# Altium schematic symbol library Schlib1.SchLib: 65 symbols
Pins are listed as number, name and electrical type; pins without a type are passive.

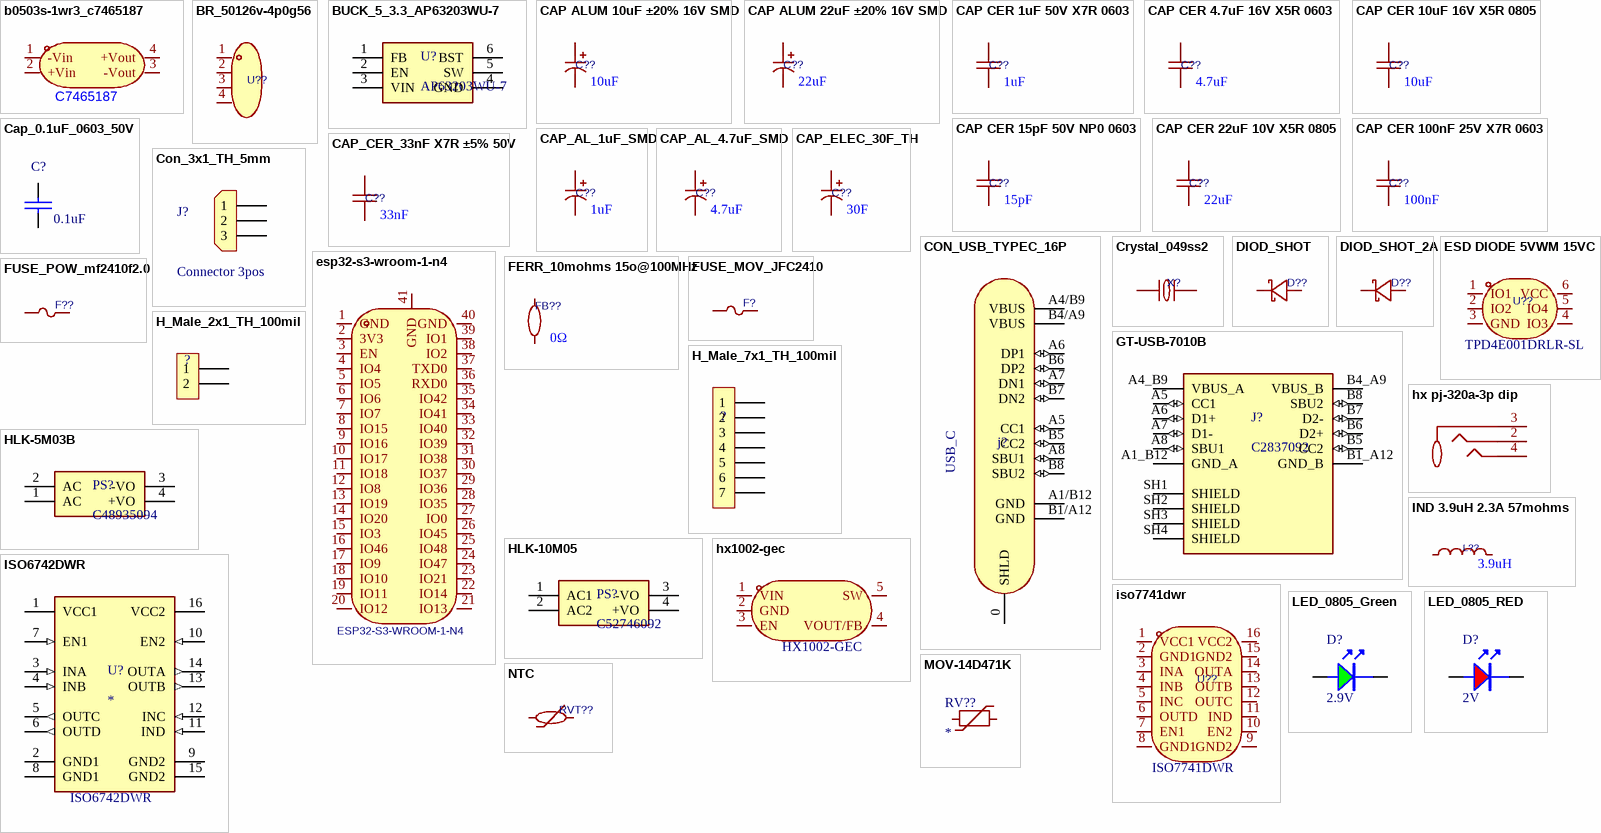
[diagram p0: symbols b0503s-1wr3_c7465187 to NTC]

## b0503s-1wr3_c7465187
designator U??  Supplier Part Number 1: C7465187  (hidden comment: b0503s-1wr3_c7465187)
Type:Plastic encapsulated type Number of Outputs:1 Output Power:1W Voltage - Supply:4.5V~5.5V Voltage - Supply:4.5V~5.5V Conversion Efficiency:74% Conversion Efficiency:74% Output Voltage:3.3V Output Voltage:3.3V Output Current(Max):303mA Output Current(M; Manufacturer 1: EVISUN(易成); Manufacturer Part Number 1: B0503S-1WR3; Supplier 1: LCSC; ComponentLink1Description: LCSC; ComponentLink1URL: https://www.lcsc.com/product-detail/C7465187.html?s_z=n_q_p_b0503s-1wr3_c7465187
footprint PWRM-TH_B0503S-1WR2
pins: 1 -Vin, 2 +Vin, 3 -Vout, 4 +Vout

## BR_50126v-4p0g56
designator U??, comment c50126v-4p0g56  (value not drawn)
Number of Positions or Pins:1x4P Pitch:5mm Color:Green Mounting Type:Through Hole Number of Pins:4P Number of Rows:1 Number of PINs Per Row:4 Current Rating:18A Voltage Rating (Max):250V Wire Gauge - AWG:14~26 Wire Gauge - mm2:0.5~2.5 Wire Gauge - mm2:0.5; Manufacturer 1: JXTCONN; Manufacturer Part Number 1: C50126V-4P0G56; Supplier 1: LCSC; Supplier Part Number 1: C49291885; ComponentLink1Description: LCSC; ComponentLink1URL: https://www.lcsc.com/es/product-detail/C49291885.html?spm=wm.fly.bg.2.xh&lcsc_vid=QARXAVUEQ1ELXl1fE1ZXXgVfFgdaUV1TRAUKVFNRFFAxVlNfRlVdU1NQQFdcUTtW; Color: Green
footprint CONN-TH_C50126V-4P0G56
pins: 1, 2, 3, 4

## BUCK_5_3.3_AP63203WU-7
designator U?, comment AP63203WU-7
Buck Switching Regulator IC Positive Fixed 3.3V 1 Output 2A SOT-23-6 Thin, TSOT-23-6; Manufacturer 1: DIODES; ComponentLink1Description: LCSC; ComponentLink1URL: https://www.lcsc.com/es/product-detail/C780769.html?s_z=n_q_AP63203WU-7&spm=wm.fly.bg.0.xh&lcsc_vid=FFRdVwAETgNbVwAHTlRdV1UFEwcIU1ZXQVZZAlYFQAcxVlNfRlJdU1dXT1JWUTsOAxUeFF5JWBYZEEoKFBINSQcJGk4LFEsWBQ4KEgcSWgULEwUPG04tU11VRVdYVF1IHxUDCw%3D%3D; Manufacturer Part Number 1: AP63203WU-7; Supplier 1: LCSC; Supplier Part Number 1: C780769
footprint SOIC_05WU-7_DIO-M
pins: 1 FB, 2 EN, 3 VIN, 4 GND, 5 SW, 6 BST

## CAP ALUM 10uF ±20% 16V SMD
designator C??, comment value 10uF  (hidden comment: ROQANG VT1C100M0405)
Capacitance:4.7uF Tolerance:±20% Tolerance:±20% Voltage Rating:25V Diameter:4mm Height - Seated (Max):5.4mm Operating Temperature:-40℃~+105℃ Operating Temperature:-40℃~+105℃; ComponentLink1Description: LCSC; ComponentLink1URL: https://www.lcsc.com/es/product-detail/C213487.html?s_z=n_q_t_capacitor&spm=wm.fly.bg.2.xh___wm.ssy.tc.4.tz&lcsc_vid=T1EMUlBeR1ALUlVSFANeUFcFR1BWV1EHFVFaA1dQElAxVlNfRlJaV1FUQldbXzsOAxUeFF5JWBYZEEoKFBINSQcJGk4NBhYS; Manufacturer 1: ROQANG; Manufacturer Part Number 1: VT1C100M0405; Supplier 1: LCSC; Supplier Part Number 1: C213487
footprint CAP-SMD_BD4.0-L4.3-W4.3-FD
pins: 1, 2

## CAP ALUM 22uF ±20% 16V SMD
designator C??, comment value 22uF  (hidden comment: ROQANG CK1C220M-CRC54)
Capacitance:22uF Tolerance:±20% Tolerance:±20% Voltage Rating:25V Diameter:4mm Height - Seated (Max):5.4mm Operating Temperature:-40℃~+105℃ Operating Temperature:-40℃~+105℃; ComponentLink1Description: LCSC; ComponentLink1URL: https://www.lcsc.com/es/product-detail/C3001225.html?s_z=n_q_t_capacitor&spm=wm.fly.bg.18.xh___wm.ssy.tc.4.tz&lcsc_vid=T1EMUlBeR1ALUlVSFANeUFcFR1BWV1EHFVFaA1dQElAxVlNfRlJaV1FUQldbXzsOAxUeFF5JWBYZEEoKFBINSQcJGk4NBhYS; Manufacturer 1: ROQANG; Manufacturer Part Number 1: CK1C220M-CRC54; Supplier 1: LCSC; Supplier Part Number 1: C3001225
footprint CAP-SMD_BD4.0-L4.3-W4.3-FD
pins: 1, 2

## CAP CER 1uF 50V X7R 0603
designator C??, comment value 1uF  (hidden comment: CL10B105KB8NQNC)
Capacitance:1uF Tolerance:±20% Tolerance:±20% Voltage Rating:50V Ripple Current:- Equivalent Series Resistance(ESR):- Diameter:4mm Height - Seated (Max):5.4mm Lifetime:1000hrs@105℃ Operating Temperature:-45℃~+105℃ Operating Temperature:-45℃~+105℃; Manufacturer 1: Samsung Electro-Mechanics; ComponentLink1Description: LCSC; ComponentLink1URL: https://www.lcsc.com/es/product-detail/C5199872.html?spm=wm.fly.bg.9.xh&lcsc_vid=ElBYBFACR1JaVQdSQ1NeBFwHFAdfUFIFEwUNXlwCEVQxVlNfRlVWUFNWT1hWUDtW; Manufacturer Part Number 1: CL10B105KB8NQNC; Supplier 1: LSCS; Supplier Part Number 1: C5199872
footprint 0603_cap
pins: 1, 2

## CAP CER 4.7uF 16V X5R 0603
designator C??, comment value 4.7uF  (hidden comment: Samsung Electro-Mechanics)
CAP CER 4.7uF 16V X5R 0603; Manufacturer Part Number 1: CL10A475KO8NNNC; ComponentLink1Description: New link; ComponentLink1URL: https://www.lcsc.com/es/product-detail/C19666.html?spm=wm.fly.bg.0.xh___wm.fly.tp.3.ml&lcsc_vid=T1JZUwUCEwNbBlAHEwBdAVwDRAQPAV1eEVFfVgECQlMxVlNfRFdeV1BRRFhaUzsOAxUeFF5JWBYZEEoKFBINSQcJGk4LFEsFFhULAAsUDk5dV0oOAwwC; Manufacturer 1: Samsung Electro-Mechanics; Supplier Part Number 1: C19666; Supplier 1: LCSC
footprint 0603_cap
pins: 1, 2

## CAP CER 10uF 16V X5R 0805
designator C??, comment value 10uF  (hidden comment: muRata GRM21BR61C106KE15L)
CAP CER 10uF 16V X5R 0805; ComponentLink1Description: New link; ComponentLink1URL: https://www.lcsc.com/es/product-detail/C77075.html?spm=wm.fly.bg.11.xh___wm.fly.dhl.mly.13-0-3&lcsc_vid=ElBYBFACR1JaVQdSQ1NeBFwHFAdfUFIFEwUNXlwCEVQxVlNfRlVWUFNWT1hWUDtW; Manufacturer 1: muRata; Manufacturer Part Number 1: GRM21BR61C106KE15L; Supplier Part Number 1: C77075; Supplier 1: LCSC
footprint 0805_cap
pins: 1, 2

## CAP CER 15pF 50V NP0 0603
designator C??, comment value 15pF  (hidden comment: YAGEO CC0603JRNPO9BN150)
Capacitance:15pF Tolerance:±5% Tolerance:±5% Voltage Rating:50V Temperature Coefficient:C0G; Manufacturer 1: Chinocera; Manufacturer Part Number 1: HGC0603G0150J500NTHJ; ComponentLink1Description: LCSC; ComponentLink1URL: https://www.lcsc.com/product-detail/C465156.html?s_z=n_q_HGC0603G0150J500NTHJ; Supplier 1: LCSC; Supplier Part Number 1: C465156
footprint 0603_cap
pins: 1, 2

## CAP CER 22uF 10V X5R 0805
designator C??, comment value 22uF  (hidden comment: Chinocera HGC0805R5226K100NSLJ)
CAP CER 22uF 10V X5R 0805; ComponentLink1Description: LCSC; ComponentLink1URL: https://www.lcsc.com/es/product-detail/C7432777.html?spm=wm.fly.bg.4.xh___wm.fly.dhl.mly.13-0-3&lcsc_vid=ElBYBFACR1JaVQdSQ1NeBFwHFAdfUFIFEwUNXlwCEVQxVlNfRlVWUFNWT1hWUDtW; Manufacturer 1: Chinocera; Manufacturer Part Number 1: HGC0805R5226K100NSLJ; Supplier 1: LCSC; Supplier Part Number 1: C7432777
footprint 0805_cap
pins: 1, 2

## CAP CER 100nF 25V X7R 0603
designator C??, comment value 100nF  (hidden comment: AIDE CAPACITOR 0603X7R104K250NT)
CAP CER 100nF 25V X7R 0603; ComponentLink1Description: LCSC; ComponentLink1URL: https://www.lcsc.com/product-detail/C465156.html?s_z=n_q_HGC0603G0150J500NTHJ; Manufacturer 1: AIDE CAPACITOR; Manufacturer Part Number 1: 0603X7R104K250NT; Supplier 1: LCSC; Supplier Part Number 1: C48579280
footprint 0603_cap
pins: 1, 2

## Cap_0.1uF_0603_50V
designator C?, comment value 0.1uF  (hidden comment: 0.1uF 50V)
50V 100nF Y5V -20%~+80% 0603 Multilayer Ceramic Capacitors MLCC - SMD/SMT ROHS; Manufacturer 1: Walsin Tech Corp; Manufacturer Part Number 1: 0603F104Z500CT; Supplier 1: LCSC; Supplier Part Number 1: C83060; ComponentLink1Description: LCSC; ComponentLink1URL: https://www.lcsc.com/product-detail/Multilayer-Ceramic-Capacitors-MLCC-SMD-SMT_Walsin-Tech-Corp-0603F104Z500CT_C83060.html
footprint 0603_cap
pins: 1, 2

## CAP_AL_1uF_SMD
designator C??, comment value 1uF  (hidden comment: vz1h010mb054000ce0)
Capacitance:1uF Tolerance:±20% Tolerance:±20% Voltage Rating:50V Ripple Current:- Equivalent Series Resistance(ESR):- Diameter:4mm Height - Seated (Max):5.4mm Lifetime:1000hrs@105℃ Operating Temperature:-45℃~+105℃ Operating Temperature:-45℃~+105℃; Manufacturer 1: huawei group; Manufacturer Part Number 1: VZ1H010MB054000CE0; Supplier 1: LCSC; Supplier Part Number 1: C189271; ComponentLink1Description: LCSC; ComponentLink1URL: https://www.lcsc.com/product-detail/C189271.html?s_z=n_q_VZ1H010MB054000CE0
footprint CAP-SMD_BD4.0-L4.3-W4.3-FD
pins: 1, 2

## CAP_AL_4.7uF_SMD
designator C??, comment value 4.7uF  (hidden comment: rvt1e4r7m0405)
Capacitance:4.7uF Tolerance:±20% Tolerance:±20% Voltage Rating:25V Diameter:4mm Height - Seated (Max):5.4mm Operating Temperature:-40℃~+105℃ Operating Temperature:-40℃~+105℃; Manufacturer 1: ROQANG; ComponentLink1Description: LCSC; ComponentLink1URL: https://www.lcsc.com/es/product-detail/C41435083.html?s_z=n_q_t_capacitor&spm=wm.fly.bg.1.xh___wm.ssy.tc.4.tz&lcsc_vid=T1EMUlBeR1ALUlVSFANeUFcFR1BWV1EHFVFaA1dQElAxVlNfRlJaV1FUQldbXzsOAxUeFF5JWBYZEEoKFBINSQcJGk4NBhYS; Manufacturer Part Number 1: RVT1E4R7M0405; Supplier 1: LCSC; Supplier Part Number 1: C41435083
footprint CAP-SMD_BD4.0-L4.3-W4.3-FD
pins: 1, 2

## CAP_CER_33nF X7R ±5% 50V
designator C??, comment value 33nF  (hidden comment: AIDE CAPACITOR 0603X7R333J500NT)
33nF X7R ±5% 50V 0603 Ceramic Capacitors RoHS; ComponentLink1Description: LCSC; ComponentLink1URL: https://www.lcsc.com/product-detail/C49326639.html?s_z=n_q_AIDE%2520CAPACITOR%25200603X7R333J500NT&spm=wm.fly.bg.0.xh&lcsc_vid=FFRdVwAETgNbVwAHTlRdV1UFEwcIU1ZXQVZZAlYFQAcxVlNfRlJdU1VSRlReXjsOAxUeFF5JWBYZEEoKFBINSQcJGk4LFEsFFhULAAsUDk5fVl1fWQkaCgg%3D; Manufacturer 1: AIDE CAPACITOR; Manufacturer Part Number 1: 0603X7R333J500NT; Supplier 1: LCSC; Supplier Part Number 1: C49326639
footprint 0603_cap
pins: 1, 2

## CAP_ELEC_30F_TH
designator C??, comment value 30F  (hidden comment: hp-2r7-j306vyj23)
Capacitance:30F Tolerance:0%~+30% Tolerance:0%~+30% Voltage Rating:2.7V Pin Spacing:7.5mm Diameter:18mm Height - Seated (Max):26mm Operating Temperature:-40℃~+70℃ Operating Temperature:-40℃~+70℃; Manufacturer 1: KAMCAP; ComponentLink1Description: LCSC; ComponentLink1URL: https://www.lcsc.com/product-detail/C7436773.html?s_z=n_q_HP-2R7-J306VYJ23; Manufacturer Part Number 1: HP-2R7-J306VYJ23; Supplier 1: LCSC; Supplier Part Number 1: C7436773
footprint CAP-TH_BD18.0-P7.50-D0.8-FD-H26.0
pins: 1, 2

## Con_3x1_TH_5mm
designator J?, comment Connector 3pos
1x3P 10A -40℃~+105℃ 300V Green 14~26 Through Hole 5mm 2.5 1 3 Plugin,P=5mm Screw Terminal Blocks ROHS; Manufacturer 1: MAX; Manufacturer Part Number 1: MX126-5.0-03P-GN01-Cu-S-A; Supplier 1: LCSC; Supplier Part Number 1: C5188435; ComponentLink1Description: Digi-Key; ComponentLink1URL: https://lcsc.com/product-detail/Screw-Terminal-Blocks_MAX-MX126-5-0-03P-GN01-Cu-S-A_C5188435.html
footprint CON_3x1_TH_5mm
pins: 1, 2, 3

## CON_USB_TYPEC_16P
designator j?, comment value USB_C  (hidden comment: USB C)
3A USB 3.1 1 Surface Mount 16P Female -40℃~+85℃ Type-C SMD USB Connectors ROHS; Manufacturer 1: SHOU HAN; Manufacturer Part Number 1: TYPE-C-3.1-16PIN; Supplier 1: LCSC; Supplier Part Number 1: C7507405; ComponentLink1Description: LCSC; ComponentLink1URL: https://lcsc.com/product-detail/USB-Connectors_SHOU-HAN-TYPE-C-3-1-16PIN_C7507405.html
footprint CON_USB_C_16P_RA
pins: 0 SHLD, A1/B12 GND (power), A4/B9 VBUS (power), A5 CC1 (io), A6 DP1 (io), A7 DN1 (io), A8 SBU1 (io), B1/A12 GND (power), B4/A9 VBUS (power), B5 CC2 (io), B6 DP2 (io), B7 DN2 (io), B8 SBU2 (io)

## Crystal_049ss2
designator X?, comment 049ss2-8.192f12dzlal  (value not drawn)
Type:Crystal Oscillator Frequency:8.192MHz Normal temperature Frequency Tolerance:±20ppm Normal temperature Frequency Tolerance:±20ppm Load Capacitance:12pF Frequency Stability:±100ppm Frequency Stability:±100ppm Equivalent Series Resistance(ESR):60Ω Oper; Manufacturer 1: HCI; Value: 8.192MHz; Operating Temperature: -40℃~+125℃; ComponentLink1Description: LCSC; ComponentLink1URL: https://www.lcsc.com/es/product-detail/C19674267.html?s_z=n_q_049ss2-8.192f12dzlal&spm=wm.fly.bg.0.xh&lcsc_vid=FFRdVwAETgNbVwAHTlRdV1UFEwcIU1ZXQVZZAlYFQAcxVlNfRlJdU11WRldaVDsOAxUeFF5JWBYZEEoKFBINSQcJGk4LFEsWBQ4KEgcSWgULEwUPG04tUFBVQVZZVEoOAwwC; Manufacturer Part Number 1: 049SS2-8.192F12DZLAL; Supplier 1: LCSC; Supplier Part Number 1: C19674267
footprint HC-49S_L11.4-W4.7-LS12.7
pins: 1, 2

## DIOD_SHOT
designator D??, comment ms2a40lws  (value not drawn)
Voltage - Forward(Vf@If):370mV@1A Voltage - DC Reverse(Vr):40V Current - Rectified:2A Reverse Leakage Current (Ir):80uA@40V Operating Junction Temperature Range:-50℃~+125℃ Operating Junction Temperature Range:-50℃~+125℃ Non-Repetitive Peak Forward Surge C; Manufacturer 1: MSKSEMI; ComponentLink1Description: LCSC; ComponentLink1URL: https://www.lcsc.com/es/product-detail/C7380001.html?s_z=n_q_l_Schottky&spm=wm.fly.bg.0.xh___wm.fly.tp.1.ml&lcsc_vid=QARXAVUEQ1ELXl1fE1ZXXgVfFgdaUV1TRAUKVFNRFFAxVlNfRlVcVlxTQ1BcVTsOAxUeFF5JWBYZEEoKFBINSQcJGk4LFEsVEgAcBAw%3D; Manufacturer Part Number 1: MS2A40LWS; Supplier 1: LCSC; Supplier Part Number 1: C7380001
footprint SOD-323_L1.7-W1.3-LS2.7-RD-1 - duplicate
pins: 1 K, 2 A

## DIOD_SHOT_2A
designator D??, comment ms2a40lws  (value not drawn)
30V 1 Independent 125mV@1mA 1.5A SOD-123F Single Diodes RoHS; Manufacturer 1: onsemi; Manufacturer Part Number 1: MBRA210LT3G; ComponentLink1Description: LCSC; ComponentLink1URL: https://www.lcsc.com/product-detail/C145190.html; Supplier 1: LCSC; Supplier Part Number 1: C145190
footprint SMA_L4.4-W2.8-LS5.4-RD
pins: 1 K, 2 A

## ESD DIODE 5VWM 15VC
designator U??, comment Manufacturer Part Number 1: TPD4E001DRLR-SL  (hidden comment: C33962536)
Polarity:Unidirectional Reverse Stand-Off Voltage (Vrwm):5.5V Clamping Voltage:15V Voltage - Breakdown:8V Reverse Leakage Current (Ir):100nA Number of Channels:Four channels Operating Temperature:-55℃~+150℃ Operating Temperature:-55℃~+150℃ level of protec; Manufacturer 1: Slkor; ComponentLink1Description: LCSC; ComponentLink1URL: https://www.lcsc.com/es/product-detail/C33962536.html?s_z=n_q_p_tpd4e001drlr_c2987155&spm=wm.ssy.bg.3.xh&lcsc_vid=FFRdVwAETgNbVwAHTlRdV1UFEwcIU1ZXQVZZAlYFQAcxVlNfRlJdUlNfQFNWXjsOAxUeFF5JWBYZEEoKFBINSQcJGk4LFEsWBQ4KEgcSWgULEwUPG04tVVJRRlJYVkoOAwwC; Supplier 1: LCSC; Supplier Part Number 1: C33962536
footprint SOT-563_L1.6-W1.2-P0.50-LS1.6-BL
pins: 1 IO1, 2 IO2, 3 GND, 4 IO3, 5 IO4, 6 VCC

## esp32-s3-wroom-1-n4
designator U??
Utilized IC / Part:ESP32-S3 Wireless Standard:Bluetooth5.0 Interface Type:I2C；GPIO；UART；SPI；USB；I2S Frequency:2.4GHz Antenna Type:On-board PCB Antenna Output Power:20.5dBm Output Power:20.5dBm Voltage - Supply:3V~3.6V Voltage - Supply:3V~3.6V Receive  Cur; Manufacturer 1: ESPRESSIF; Operating Temperature: -40℃~+85℃; ComponentLink1Description: LCSC; ComponentLink1URL: https://www.lcsc.com/product-detail/C2913197.html?s_z=h_q_esp32-s3-wroom-1-n4; Manufacturer Part Number 1: ESP32-S3-WROOM-1-N4; Supplier 1: LCSC; Supplier Part Number 1: C2913197; Symbol: ESP32-S3-WROOM-1-N4
footprint WIFIM-SMD_ESP32-S3-WROOM-1-N8
pins: 1 GND, 2 3V3, 3 EN, 4 IO4, 5 IO5, 6 IO6, 7 IO7, 8 IO15, 9 IO16, 10 IO17, 11 IO18, 12 IO8, 13 IO19, 14 IO20, 15 IO3, 16 IO46, 17 IO9, 18 IO10, 19 IO11, 20 IO12, 21 IO13, 22 IO14, 23 IO21, 24 IO47, 25 IO48, 26 IO45, 27 IO0, 28 IO35, 29 IO36, 30 IO37, 31 IO38, 32 IO39, 33 IO40, 34 IO41, 35 IO42, 36 RXD0, 37 TXD0, 38 IO2, 39 IO1, 40 GND, 41 GND

## FERR_10mohms 15o@100MHz
designator FB??, comment value 0Ω  (hidden comment: Yanchuang SCBM160808U090T)
10mΩ 15Ω@100MHz 0603 Ferrite Beads and Chips; ComponentLink1Description: LCSC; ComponentLink1URL: https://www.lcsc.com/es/product-detail/C52205324.html?s_z=s_c_Ferrite%2520Beads%2520and%2520Chips&spm=wm.fly.bg.0.xh&lcsc_vid=T1EMUlBeR1ALUlVSFANeUFcFR1BWV1EHFVFaA1dQElAxVlNfRlJaVFNSQlhYUjsOAxUeFF5JWBYZEEoKFBINSQcJGk4LFEsFFhULAAsUDk5fVlNWWQkaCgg%3D; Manufacturer 1: Yanchuang; Manufacturer Part Number 1: SCBM160808U090T; Supplier 1: LCSC; Supplier Part Number 1: C52205324
footprint 0603_cap
pins: 1, 2

## FUSE_MOV_JFC2410
designator F?, comment JDTfuse JFC2410-0200TS  (value not drawn)
Surface Mount Fuse 200mA 250V 2410 Fuses; ComponentLink1Description: LCSC; ComponentLink1URL: https://www.lcsc.com/product-detail/C55058769.html?s_z=n_q_JFC2410-0200TS; Manufacturer 1: JDTfuse; Manufacturer Part Number 1: JFC2410-0200TS; Supplier 1: LCSC; Supplier Part Number 1: C55058769
footprint FUSE-SMD_L6.1-W2.7
pins: 1, 2

## FUSE_POW_mf2410f2.0
designator F??, comment mf2410f2.000tm  (value not drawn)
Type:Surface Mount Fuse Current Rating:2A Voltage Rating (DC):250V Operating Temperature:-55℃~+125℃ Operating Temperature:-55℃~+125℃ Melting I2t:3 Interrupt Rating:100A Diameter (φD):- Length:6.1mm Width:2.49mm Height:2.16mm Pitch:-; Manufacturer 1: AEM; ComponentLink1Description: LCSC; ComponentLink1URL: https://www.lcsc.com/es/product-detail/C83797.html?s_z=n_q_mf2410f2.000tm&spm=wm.fly.bg.0.xh&lcsc_vid=FFRdVwAETgNbVwAHTlRdV1UFEwcIU1ZXQVZZAlYFQAcxVlNfRlJdU11fQFRdUDsOAxUeFF5JWBYZEEoKFBINSQcJGk4LFEsWBQ4KEgcSWgULEwUPG04tUlFWQllZUV1IHxUDCw%3D%3D; Manufacturer Part Number 1: MF2410F2.000TM; Supplier 1: LCSC; Supplier Part Number 1: C83797
footprint F2410
pins: 1, 2

## GT-USB-7010B
designator J?, comment C2837092
Horizontal Type-C 16P Female SMT; MF: G-switch; MP: GT-USB-7010B; SnapEDA_Link: https://www.snapeda.com/parts/GT-USB-7010B/G-switch/view-part/?ref=snap; Package: None; Value: *; Check_prices: https://www.snapeda.com/parts/GT-USB-7010B/G-switch/view-part/?ref=eda; ComponentLink1Description: New link; ComponentLink1URL: https://www.lcsc.com/es/product-detail/C2837092.html?s_z=n_q_GT-USB-7010B&spm=wm.fly.bg.0.xh&lcsc_vid=FFRdVwAETgNbVwAHTlRdV1UFEwcIU1ZXQVZZAlYFQAcxVlNfRlJdUlRSRVRZUzsOAxUeFF5JWBYZEEoKFBINSQcJGk4LFEsFFhULAAsUDk5WSQwSGg0%3D
footprint G-SWITCH_GT-USB-7010B
pins: A1_B12 GND_A (power), A4_B9 VBUS_A (power), A5 CC1 (io), A6 D1+ (io), A7 D1- (io), A8 SBU1 (io), B1_A12 GND_B (power), B4_A9 VBUS_B (power), B5 CC2 (io), B6 D2+ (io), B7 D2- (io), B8 SBU2 (io), SH1 SHIELD, SH2 SHIELD, SH3 SHIELD, SH4 SHIELD

## H_Male_2x1_TH_100mil
designator ?, comment 2x1  (value not drawn)  (no BOM)
H_Male_2x1_TH_100mil; ComponentLink1Description: LCSC
footprint H_2x1_TH_100mil
pins: 1, 2

## H_Male_7x1_TH_100mil
designator ?, comment 7x1  (value not drawn)  (no BOM)
H_Male_7x1_TH_100mil; ComponentLink1Description: LCSC
footprint H_7x1_TH_100mil
pins: 1, 2, 3, 4, 5, 6, 7

## HLK-5M03B
designator PS?, comment C48935094
5W Ultra-Compact Power Module; Manufacturer 1: HI-LINK; Manufacturer Part Number 1: HLK-5M03B; Value: HI_LINK_3.3V; ComponentLink1Description: LCSC; ComponentLink1URL: https://www.lcsc.com/es/product-detail/C48935094.html?s_z=n_q_HI-LINK%2520HLK-5M03&spm=wm.fly.bg.2.xh&lcsc_vid=QARXAVUEQ1ELXl1fE1ZXXgVfFgdaUV1TRAUKVFNRFFAxVlNfRlVfXlNSRVRdVzsOAxUeFF5JWBYZEEoKFBINSQcJGk4LFEsWBQ4KEgcSWgULEwUPG04tX1xURlFbSQwSGg0%3D; Supplier 1: LCSC; Supplier Part Number 1: C48935094
footprint PWRM-TH_4P-L39.0-W23.5_HI-LINK_HLK-5MXXB
pins: 1 AC, 2 AC, 3 -VO, 4 +VO

## HLK-10M05
designator PS?, comment C52746092
10W Ultra-Compact Power Module; Manufacturer 1: HI-LINK; Manufacturer Part Number 1: HLK-10M05T; Value: HI_LINK_5V; ComponentLink1Description: LCSC; ComponentLink1URL: https://www.lcsc.com/es/product-detail/C52746092.html?s_z=n_q_HLK-10M05&spm=wm.fly.bg.1.xh&lcsc_vid=FFRdVwAETgNbVwAHTlRdV1UFEwcIU1ZXQVZZAlYFQAcxVlNfRlJdUlVUT1RdXzsOAxUeFF5JWBYZEEoKFBINSQcJGk4LFEsWBQ4KEgcSWgULEwUPG04tVVxVQFFXVUoOAwwC; Supplier 1: LCSC; Supplier Part Number 1: C52746092
footprint CONV_HLK-10M05
pins: 1 AC1, 2 AC2, 3 -VO, 4 +VO

## hx1002-gec
designator U??
Function:Step-down type Voltage - Supply:3.4V~5.5V Voltage - Supply:3.4V~5.5V Output Voltage:3.3V Output Voltage:3.3V Output Current:1.3A Frequency - Switching:1MHz Frequency - Switching:1MHz Operating Temperature:-40℃~+85℃@(TA) Operating Temperature:-40℃; Manufacturer 1: HEXIN; Supplier 1: LCSC; Supplier Part Number 1: C47115461; ComponentLink1Description: New link; ComponentLink1URL: https://www.lcsc.com/product-detail/C47115461.html?s_z=n_q_HX1002-GEC&spm=wm.fly.bg.0.xh&lcsc_vid=FgNcU1VVElNeBldeQQRZX1dUEQNWVQcHT1lYV11XRlMxVlNfQ1ZbXlRTRVZbVjsOAxUeFF5JWBYZEEoKFBINSQcJGk4eFQsCAgIaSgADAwAHC0slRVZbX1xWR08GEwkK; Manufacturer Part Number 1: HX1002-GEC
footprint SOT-23-5_L2.9-W1.6-P0.95-LS2.9-BL
pins: 1 VIN, 2 GND, 3 EN, 4 VOUT/FB, 5 SW

## hx pj-320a-3p dip
designator U??  (value not drawn)
Connector Type:3.5mm Headphone Jack Current Rating:500mA Voltage Rating (Max):30V Operating Temperature:-30℃~+70℃ Operating Temperature:-30℃~+70℃ Rank Number:TRS Mounting Style:Right-Angle Body Height:5mm Length:14.1mm Width:6mm; Manufacturer 1: hanxia; ComponentLink1Description: LCSC; ComponentLink1URL: https://www.lcsc.com/product-detail/C19189087.html?s_z=n_q_hx%2520pj-320a-3p%2520dip; Manufacturer Part Number 1: HX PJ-320A-3P DIP; Supplier 1: LCSC; Supplier Part Number 1: C19189087
footprint AUDIO-SMD_HX-PJ-320A-3P-DIP
pins: 2, 3, 4

## IND 3.9uH 2.3A 57mohms
designator L??, comment value 3.9uH  (hidden comment: znr4030st3r9m)
Inductance:3.9uH Tolerance:±20% Tolerance:±20% Current Rating:2.3A Current - Saturation(Isat):3.3A DC Resistance(DCR):57mΩ Type:Magnetic Shielded Inductor; Manufacturer 1: ZE; ComponentLink1Description: LCSC; ComponentLink1URL: https://www.lcsc.com/product-detail/C42429307.html?s_z=n_q_ZNR4030ST3R9M; Manufacturer Part Number 1: ZNR4030ST3R9M; Supplier 1: LCSC; Supplier Part Number 1: C42429307
footprint IND-SMD_L4.0-W4.0_VLCF4028T
pins: 1, 2

## ISO6742DWR
designator U?  Manufacturer Part Number 1: ISO6742DWR
General-purpose, quad-channel, 2/2 digital isolator; Manufacturer 1: TI; ComponentLink1Description: LCSC; ComponentLink1URL: https://www.lcsc.com/product-detail/C5216407.html?s_z=n_q_ISO6742DWR; Supplier 1: LCSC; Supplier Part Number 1: C5216407
footprint SOIC127P1030X265-16N
pins: 1 VCC1 (power), 2 GND1 (power), 3 INA (in), 4 INB (in), 5 OUTC (out), 6 OUTD (out), 7 EN1 (in), 8 GND1 (power), 9 GND2 (power), 10 EN2 (in), 11 IND (in), 12 INC (in), 13 OUTB (out), 14 OUTA (out), 15 GND2 (power), 16 VCC2 (power)

## iso7741dwr
designator U??, comment Manufacturer Part Number 1: ISO7741DWR  (hidden comment: C571196)
Number of Forward Channels:3 Number of Reverse Channels:1 Data Rate(Max):100Mbps Default Output:High Level Isolation Voltage(Vrms):5000 CMTI(kV/us):100kV/us Propagation Delay(tpd):10.7ns Features:Channel direction configurable；Fail-safe output Voltage - S; Manufacturer 1: TI; ComponentLink1Description: LCSC; ComponentLink1URL: https://www.lcsc.com/es/product-detail/C571196.html?s_z=n_q_iso7741dwr&spm=wm.fly.bg.0.xh&lcsc_vid=FFRdVwAETgNbVwAHTlRdV1UFEwcIU1ZXQVZZAlYFQAcxVlNfRlJdUlZUQVBeVTsOAxUeFF5JWBYZEEoKFBINSQcJGk4LFEsWBQ4KEgcSWgULEwUPG04tUlZRQ1deXlZIHxUDCw%3D%3D; Supplier 1: LCSC; Supplier Part Number 1: C571196
footprint SOIC-16_L10.3-W7.5-P1.27-LS10.3-BL
pins: 1 VCC1, 2 GND1, 3 INA, 4 INB, 5 INC, 6 OUTD, 7 EN1, 8 GND1, 9 GND2, 10 EN2, 11 IND, 12 OUTC, 13 OUTB, 14 OUTA, 15 GND2, 16 VCC2

## LED_0805_Green
designator D?, comment 2.9V
LED GREEN CLEAR 0805 SMD; Manufacturer: XINGLIGHT; Manufacturer Part Number: XL-2012UGC; Supplier 1: LCSC; Supplier Part Number 1: C965815; ComponentLink1Description: LCSC; ComponentLink1URL: https://www.lcsc.com/product-detail/Light-Emitting-Diodes-LED_XINGLIGHT-XL-2012UGC_C965815.html
footprint 0805_LED
pins: 1 A, 2

## LED_0805_RED
designator D?, comment 2V
LED RED CLEAR 0805 SMD; Manufacturer: XINGLIGHT; Manufacturer Part Number: XL-2012SURC; Supplier 1: LCSC; Supplier Part Number 1: C965812; ComponentLink1Description: LCSC; ComponentLink1URL: https://www.lcsc.com/product-detail/Light-Emitting-Diodes-LED_XINGLIGHT-XL-2012SURC_C965812.html
footprint 0805_LED
pins: 1 A, 2

## MOV-14D471K
designator RV??
470 V 4.5 kA Varistor 1 Circuit Through Hole Disc 14mm; Manufacturer 1: BOURNS; Manufacturer Part Number 1: MOV-14D471K; Supplier 1: LCSC; Supplier Part Number 1: C1527439; ComponentLink1Description: LCSC; ComponentLink1URL: https://www.lcsc.com/es/product-detail/C1527439.html?s_z=n_q_MOV-14D471K&spm=wm.fly.bg.0.xh&lcsc_vid=FFRdVwAETgNbVwAHTlRdV1UFEwcIU1ZXQVZZAlYFQAcxVlNfRlJdUlZRQlZXVjsOAxUeFF5JWBYZEEoKFBINSQcJGk4LFEsWBQ4KEgcSWgULEwUPG04tUlNXRlhYSQwSGg0%3D; ComponentLink2Description: Datasheet; ComponentLink2URL: https://www.lcsc.com/datasheet/C1527439.pdf
footprint MOV14D471K
pins: 1, 2

## NTC
designator RVT??, comment C5240595  (value not drawn)
Resistance @ 25℃:5Ω Resistance Tolerance:±20% Resistance Tolerance:±20% B Constant Tolerance:±10% B Constant (25℃/85℃):2700K Steady State Current (Max):3A Dissipation Factor:11mW/℃ Thermal Time Constant:35s Operating Temperature:-40℃~+175℃ Operating Tempe; Manufacturer 1: VDR; Manufacturer Part Number 1: NTC 5D-9; ComponentLink1Description: LCSC; ComponentLink1URL: https://www.lcsc.com/es/product-detail/C5240595.html?s_z=s_p_NTC%25205D-9&spm=wm.fly.bg.0.xh&lcsc_vid=FFRdVwAETgNbVwAHTlRdV1UFEwcIU1ZXQVZZAlYFQAcxVlNfRlJdUldVQVJeUDsOAxUeFF5JWBYZEEoKFBINSQcJGk4LFEsWBQ4KEgcSWgULEwUPG04tVlFUQFVdXkoOAwwC; Supplier 1: LCSC; Supplier Part Number 1: C5240595
footprint RES-TH_L11.0-W5.5-P7.50-D0.8-S5.50
pins: 1, 2

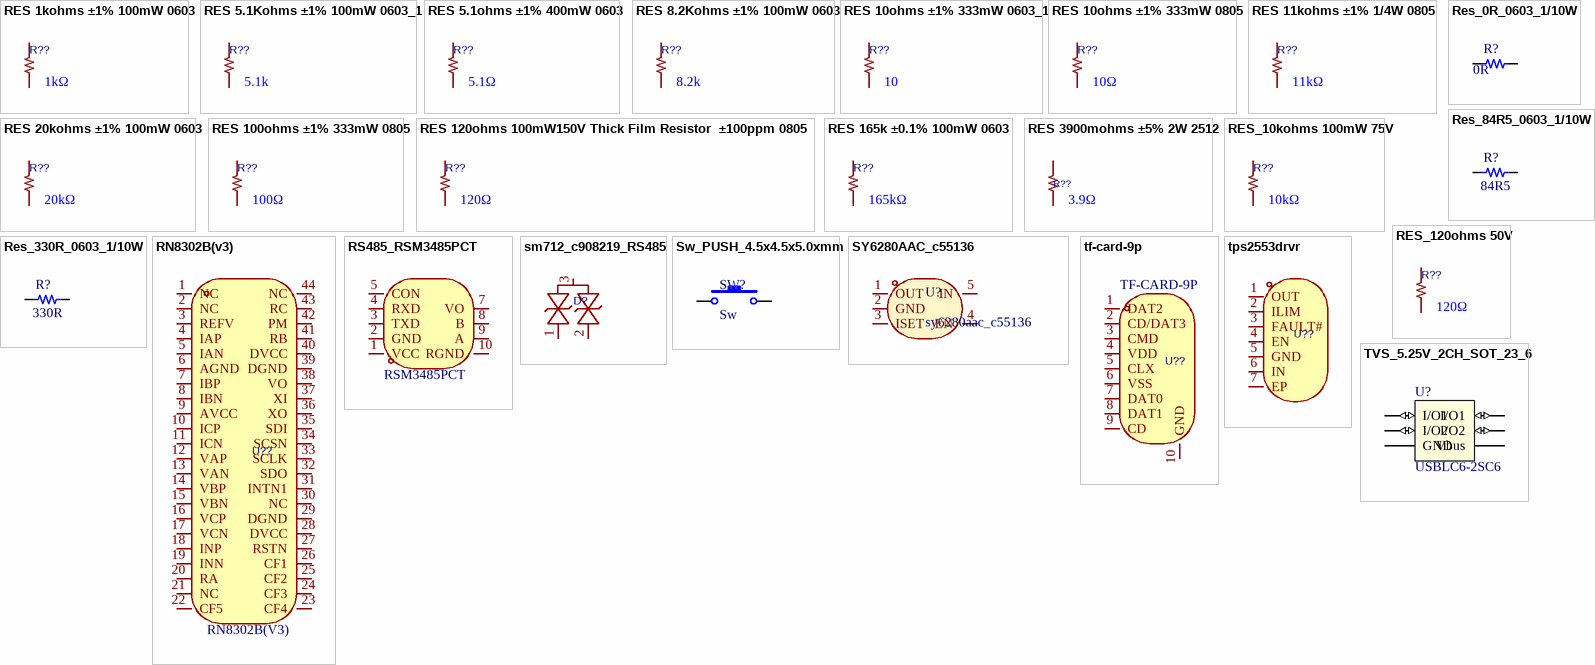
[diagram p1: symbols RES 1kohms ±1% 100mW 0603 to TVS_5.25V_2CH_SOT_23_6]

## RES 1kohms ±1% 100mW 0603
designator R??, comment value 1kΩ  (hidden comment: FOJAN FRC0603F1001TS)
RES 1kΩ ±1% 100mW 0603; Supplier 1: LCSC; Supplier Part Number 1: C2907002; Manufacturer Part Number 1: FRC0603F1001TS; Manufacturer 1: FOJAN; ComponentLink1Description: New link; ComponentLink1URL: https://www.lcsc.com/es/product-detail/C2907002.html?spm=wm.fly.bg.1.xh___wm.fly.dhl.mly.13-6-1&lcsc_vid=T1EMUlBeR1ALUlVSFANeUFcFR1BWV1EHFVFaA1dQElAxVlNfRlJaV1FUQldbXzsOAxUeFF5JWBYZEEoKFBINSQcJGk4NBhYS
footprint 0603_RES
pins: 1, 2

## RES 5.1Kohms ±1% 100mW 0603_1
designator R??, comment value 5.1k  (hidden comment: UNI-ROYAL HP05W3F100JT5E)
5.11kΩ 100mW 50V Thick Film Resistor ±1% ±100ppm/℃ 0603 Chip Resistor - Surface Mount; Manufacturer 1: HWA CHN; Manufacturer Part Number 1: HRC0603F5111ENTN; ComponentLink1Description: New link; ComponentLink1URL: https://www.lcsc.com/product-detail/C55098456.html; Supplier Part Number 1: C55098456; Supplier 1: LCSC
footprint 0603_RES
pins: 1, 2

## RES 5.1ohms ±1% 400mW 0603
designator R??, comment value 5.1Ω  (hidden comment: SEI(Stackpole Electronics Inc.))
RES 5.1Ω ±1% 400mW 0603; Manufacturer 1: UNI-ROYAL HQ03W5F510KT5E; Manufacturer Part Number 1: HQ03W5F510KT5E; Supplier Part Number 1: C2791987; Supplier 1: LCSC; ComponentLink1Description: New link; ComponentLink1URL: https://www.lcsc.com/es/product-detail/C2907011.html?spm=wm.fly.bg.0.xh___wm.fly.tp.1.ml&lcsc_vid=TlUKUVJeQVYNVVcAFQBcBQJfRlgPUVYCQllYVwUHEQcxVlNfRFRfUVJUQ1JcXzsOAxUeFF5JWBYZEEoKFBINSQcJGk4LFEs%3D
footprint 0603_RES
pins: 1, 2

## RES 8.2Kohms ±1% 100mW 0603
designator R??, comment value 8.2k  (hidden comment: UNI-ROYAL HP05W3F100JT5E)
RES 8.2kΩ ±1% 100mW 0603; Manufacturer 1: FOJAN; Manufacturer Part Number 1: FRC0603F8201TS; ComponentLink1Description: New link; ComponentLink1URL: https://www.lcsc.com/product-detail/C2907069.html; Supplier Part Number 1: C2907069; Supplier 1: LCSC
footprint 0603_RES
pins: 1, 2

## RES 10ohms ±1% 333mW 0603_1
designator R??, comment value 10  (hidden comment: UNI-ROYAL HP05W3F100JT5E)
RES 8.2kΩ ±1% 100mW 0603; Manufacturer Part Number 1: HS03W3F100KT5E; ComponentLink1Description: New link; ComponentLink1URL: https://www.lcsc.com/product-detail/C55251173.html; Manufacturer 1: UNI-ROYAL; Supplier Part Number 1: C55251173; Supplier 1: LCSC
footprint 0603_RES
pins: 1, 2

## RES 10ohms ±1% 333mW 0805
designator R??, comment value 10Ω  (hidden comment: UNI-ROYAL HP05W3F100JT5E)
RES 10Ω ±1% 333mW 0805; Supplier 1: LCSC; Manufacturer 1: UNI-ROYAL; Supplier Part Number 1: C2759344; ComponentLink1Description: New link; ComponentLink1URL: https://www.lcsc.com/es/product-detail/C2759344.html?s_z=n_q_UNI-ROYAL%2520HP05W3F100JT5E&spm=wm.fly.bg.0.xh&lcsc_vid=FFRdVwAETgNbVwAHTlRdV1UFEwcIU1ZXQVZZAlYFQAcxVlNfRlJdUldeTlhdUjsOAxUeFF5JWBYZEEoKFBINSQcJGk4LFEsWBQ4KEgcSWgULEwUPG04tUlZSR1RXUkoOAwwC; Manufacturer Part Number 1: HP05W3F100JT5E
footprint 0603_RES
pins: 1, 2

## RES 11kohms ±1% 1/4W 0805
designator R??, comment value 11kΩ  (hidden comment: Walsin MR08X1102FTL)
RES 11kΩ ±1% 1/4W 0805; Supplier 1: LCSC; Manufacturer Part Number 1: MR08X1102FTL; Supplier Part Number 1: C431838; Manufacturer 1: Walsin; ComponentLink1Description: New link; ComponentLink1URL: https://www.lcsc.com/es/product-detail/C431838.html?s_z=n_q_Walsin%2520MR08X1102FTL&spm=wm.fly.bg.0.xh&lcsc_vid=FFRdVwAETgNbVwAHTlRdV1UFEwcIU1ZXQVZZAlYFQAcxVlNfRlJdUlBVQFlcUzsOAxUeFF5JWBYZEEoKFBINSQcJGk4LFEsWBQ4KEgcSWgULEwUPG04tVVNTTlJaU0oOAwwC
footprint R0805
pins: 1, 2

## RES 20kohms ±1% 100mW 0603
designator R??, comment value 20kΩ  (hidden comment: FOJAN FRC0603F2002TS)
RES 20kohms ±1% 100mW 0603; Manufacturer 1: FOJAN; Manufacturer Part Number 1: FRC0603F2002TS; Supplier Part Number 1: C2907011; Supplier 1: LCSC; ComponentLink1Description: New link; ComponentLink1URL: https://www.lcsc.com/es/product-detail/C2907011.html?spm=wm.fly.bg.0.xh___wm.fly.tp.1.ml&lcsc_vid=TlUKUVJeQVYNVVcAFQBcBQJfRlgPUVYCQllYVwUHEQcxVlNfRFRfUVJUQ1JcXzsOAxUeFF5JWBYZEEoKFBINSQcJGk4LFEs%3D
footprint 0603_RES
pins: 1, 2

## RES 100ohms ±1% 333mW 0805
designator R??, comment value 100Ω  (hidden comment: UNI-ROYAL HP05W3F1000T5E)
RES 100Ω ±1% 333mW 0805; Supplier 1: LCSC; Supplier Part Number 1: C414981; Manufacturer Part Number 1: HP05W3F1000T5E; Manufacturer 1: UNI-ROYAL; ComponentLink1Description: New link; ComponentLink1URL: https://www.lcsc.com/es/product-detail/C414981.html?s_z=n_q_UNI-ROYAL%2520HP05W3F1000T5E&spm=wm.fly.bg.0.xh&lcsc_vid=FFRdVwAETgNbVwAHTlRdV1UFEwcIU1ZXQVZZAlYFQAcxVlNfRlJdUlFWR1VeUzsOAxUeFF5JWBYZEEoKFBINSQcJGk4LFEsWBQ4KEgcSWgULEwUPG04tU1dXT1JWSQwSGg0%3D
footprint R0805
pins: 1, 2

## RES 120ohms 100mW150V Thick Film Resistor  ±100ppm 0805
designator R??, comment value 120Ω  (hidden comment: RES 120Ω ±1% 100mW 0603)
Manufacturer 1: HWA CHN; Manufacturer Part Number 1: HRC0805F1200FNTN; ComponentLink1Description: New link; ComponentLink1URL: https://www.lcsc.com/product-detail/C48996813.html; Supplier Part Number 1: C54921099; Supplier 1: LCSC
footprint 0603_RES
pins: 1, 2

## RES 165k ±0.1% 100mW 0603
designator R??, comment value 165kΩ  (hidden comment: BOURNS CR0603-FX-1653ELF)
RES 165kΩ ±0.1% 100mW 0603; Manufacturer 1: YAGEO; Manufacturer Part Number 1: RT0603BRD07165KL; ComponentLink1Description: New link; ComponentLink1URL: https://www.lcsc.com/product-detail/C861150.html; Supplier Part Number 1: C861150; Supplier 1: LCSC
footprint 0603_RES
pins: 1, 2

## RES 3900mohms ±5% 2W 2512
designator R??, comment value 3.9Ω  (hidden comment: RES 3900mΩ ±5% 2W 2512)
Type:Thick Film Resistor Resistance:3.9Ω Tolerance:±5% Tolerance:±5% Power(Watts):2W Voltage-Supply(Max):300V Operating Temperature:-55℃~+155℃ Operating Temperature:-55℃~+155℃; Manufacturer 1: UNI-ROYAL; Manufacturer Part Number 1: HP122WJ039JT4E; Supplier Part Number 1: C2758800; Supplier 1: LCSC; ComponentLink1Description: New link; ComponentLink1URL: https://www.lcsc.com/product-detail/C2758800.html?s_z=n_q_RES%25203900m%25CE%25A9%2520%25C2%25B15%2525%25202W%25202512&spm=wm.fly.bg.0.xh&lcsc_vid=FgNcU1VVElNeBldeQQRZX1dUEQNWVQcHT1lYV11XRlMxVlNfQ1ZbX1xVRlddXjsOAxUeFF5JWBYZEEoKFBINSQcJGk4dAgUUFAk%3D
footprint R2512
pins: 1, 2

## Res_0R_0603_1/10W
designator R?, comment value 0R  (hidden comment: 0R 1/10W)
RES SMD 0R OHM 5% 1/10W 0603; Manufacturer: FOJAN; Manufacturer Part Number: FRC0603P000 TS; ComponentLink1URL: https://www.lcsc.com/product-detail/Chip-Resistor-Surface-Mount_FOJAN-FRC0603P000-TS_C2907080.html; Supplier 1: LCSC; Supplier Part Number 1: C2907080; ComponentLink1Description: LCSC
footprint 0603_res (1608 Metric / 20190225 / C-A.Serna.A)
pins: 1, 2

## RES_10kohms 100mW 75V
designator R??, comment value 10kΩ  (hidden comment: SAE 1RC0603F1002)
10kΩ 100mW 75V Thick Film Resistor ±100ppm/℃ ±1% 0603 Chip Resistor - Surface Mount; Manufacturer 1: SAE; Manufacturer Part Number 1: 1RC0603F1002; Supplier Part Number 1: C53224186; Supplier 1: LCSC; ComponentLink1Description: New link; ComponentLink1URL: https://www.lcsc.com/es/product-detail/C53224186.html?spm=wm.fly.bg.4.xh___wm.fly.dhl.mly.13-6-1&lcsc_vid=T1EMUlBeR1ALUlVSFANeUFcFR1BWV1EHFVFaA1dQElAxVlNfRlJaV1FUQldbXzsOAxUeFF5JWBYZEEoKFBINSQcJGk4NBhYS
footprint 0603_RES
pins: 1, 2

## Res_84R5_0603_1/10W
designator R?, comment value 84R5  (hidden comment: 84R5 1/10W)
100mW Thick Film Resistor 50V ±100ppm/℃ ±1% 84.5Ω 0603 Chip Resistor - Surface Mount ROHS; Manufacturer: LIZ Elec; Manufacturer Part Number: CR0603FA84R5G; ComponentLink1URL: https://lcsc.com/product-detail/Chip-Resistor-Surface-Mount_LIZ-Elec-CR0603FA84R5G_C101216.html; Supplier 1: LCSC; Supplier Part Number 1: C101216; ComponentLink1Description: LCSC
footprint 0603_RES
pins: 1, 2

## RES_120ohms 50V
designator R??, comment value 120Ω  (hidden comment: HWA CHN HRC0603F1200ENTN)
100mW 120 50V Thick Film Resistor ±1% ±100ppm/℃ 0603 Chip Resistor - Surface Mount; Manufacturer 1: HWA CHN; Manufacturer Part Number 1: HRC0603F1200ENTNV; Supplier Part Number 1: C54920849; Supplier 1: LCSC; ComponentLink1Description: New link; ComponentLink1URL: https://www.lcsc.com/es/product-detail/C54920849.html?spm=wm.fly.bg.0.xh___wm.fly.dhl.mly.13-6-1&lcsc_vid=T1EMUlBeR1ALUlVSFANeUFcFR1BWV1EHFVFaA1dQElAxVlNfRlJaV1FUQldbXzsOAxUeFF5JWBYZEEoKFBINSQcJGk4NBhYS
footprint 0603_RES
pins: 1, 2

## Res_330R_0603_1/10W
designator R?, comment value 330R  (hidden comment: 330R 1/10W)
RES SMD 330R OHM 5% 1/10W 0603; Manufacturer: FOJAN; Manufacturer Part Number: FRC0603J331 TS; ComponentLink1URL: https://www.lcsc.com/product-detail/Chip-Resistor-Surface-Mount_FOJAN-FRC0603J331-TS_C2907152.html; Supplier 1: LCSC; Supplier Part Number 1: C2907152; ComponentLink1Description: LCSC
footprint 0603_res (1608 Metric / 20190225 / C-A.Serna.A)
pins: 1, 2

## RN8302B(v3)
designator U??, comment rn8302b(v3)
Meter Type:Polyphase Energy Metering IC Number of Channels:- Tolerance:0.1% Voltage - Supply:3V~3.6V Voltage - Supply:3V~3.6V Dynamic Range:10000:1 Interface:SPI Current - Supply:4.4mA Current - Supply:4.4mA Operating Temperature:-40℃~+85℃ Operating Tempe; Manufacturer 1: RENERGY; ComponentLink1Description: LCSC; ComponentLink1URL: https://www.lcsc.com/es/product-detail/C22381391.html?s_z=n_q_rn8302b%28v3%29&spm=wm.fly.bg.0.xh&lcsc_vid=FFRdVwAETgNbVwAHTlRdV1UFEwcIU1ZXQVZZAlYFQAcxVlNfRlJdUlFTRVNXXzsOAxUeFF5JWBYZEEoKFBINSQcJGk4LFEsWBQ4KEgcSWgULEwUPG04tU1VSTllfSQwSGg0%3D; Supplier 1: LCSC; Supplier Part Number 1: C22381391; Manufacturer Part Number 1: RN8302B(V3)
footprint 3
pins: 1 NC, 2 NC, 3 REFV, 4 IAP, 5 IAN, 6 AGND, 7 IBP, 8 IBN, 9 AVCC, 10 ICP, 11 ICN, 12 VAP, 13 VAN, 14 VBP, 15 VBN, 16 VCP, 17 VCN, 18 INP, 19 INN, 20 RA, 21 NC, 22 CF5, 23 CF4, 24 CF3, 25 CF2, 26 CF1, 27 RSTN, 28 DVCC, 29 DGND, 30 NC, 31 INTN1, 32 SDO, 33 SCLK, 34 SCSN, 35 SDI, 36 XO, 37 XI, 38 VO, 39 DGND, 40 DVCC, 41 RB, 42 PM, 43 RC, 44 NC

## RS485_RSM3485PCT
designator U??  Manufacturer Part Number 1: RSM3485PCT  (hidden comment: RS485_RSM3485PCT)
Data Rate:9.6Kbps ESD Protect:Yes Voltage - Supply:3.15V~3.45V Voltage - Supply:3.15V~3.45V isolation:2500V Number of Nodes:64 Quiescent Current:30mA Automatic flow control:No Operating Temperature:-40℃~+85℃ Operating Temperature:-40℃~+85℃; Manufacturer 1: VISOM; ComponentLink1Description: LCSC; ComponentLink1URL: https://www.lcsc.com/es/product-detail/C882105.html?s_z=n_q_RSM3485PCT&spm=wm.fly.bg.0.xh&lcsc_vid=T1EMUlBeR1ALUlVSFANeUFcFR1BWV1EHFVFaA1dQElAxVlNfRlJbVlVWR1RZVzsOAxUeFF5JWBYZEEoKFBINSQcJGk4LFEsFFhULAAsUDk5cUVFIHxUDCw%3D%3D; Supplier 1: LCSC; Supplier Part Number 1: C882105
footprint COMM-TH_RSM3485PCT
pins: 1 VCC, 2 GND, 3 TXD, 4 RXD, 5 CON, 7 VO, 8 B, 9 A, 10 RGND

## sm712_c908219_RS485
designator D?, comment C908219  (value not drawn)
Polarity:Bidirectional Reverse Stand-Off Voltage (Vrwm):7V Clamping Voltage:20V Peak Pulse Current (Ipp):18A Peak Pulse Power Dissipation (Ppp):360W Voltage - Breakdown:13.3V Reverse Leakage Current (Ir):1uA Number of Channels:2 Operating Temperature:-55℃; Manufacturer 1: FUXINSEMI; Manufacturer Part Number 1: SM712; Supplier Part Number 1: C908219; Supplier 1: LCSC; ComponentLink1Description: New link; ComponentLink1URL: https://www.lcsc.com/es/product-detail/C908219.html?s_z=n_q_p_sm712_c908219&spm=wm.ssy.bg.0.xh&lcsc_vid=FFRdVwAETgNbVwAHTlRdV1UFEwcIU1ZXQVZZAlYFQAcxVlNfRlJdUlJTQlRWXjsOAxUeFF5JWBYZEEoKFBINSQcJGk4LFEsWBQ4KEgcSWgULEwUPG04tVVZVT1BdXlVIHxUDCw%3D%3D
footprint SOT-23-3_L2.9-W1.3-P1.90-LS2.4-BR
pins: 1, 2, 3

## Sw_PUSH_4.5x4.5x5.0xmm
designator SW?, comment Sw
SWITCH TACTILE SPST-NO 0.05A 12V; Manufacturer 1: BZCN; Manufacturer Part Number: TSC015A05026A; Supplier 1: LCSC; Supplier Part Number 1: C2888509; Last modified by: N-A.Potosi; Last modified date: 20190222; ComponentLink1Description: LCSC; ComponentLink1URL: https://www.lcsc.com/product-detail/Tactile-Switches_BZCN-TSC015A05026A_C2888509.html
footprint Sw_PUSH_4.5x4.5x5mm
pins: 1, 2

## SY6280AAC_c55136
designator U?, comment sy6280aac_c55136
Type:High Side Switch Number of Channels:1 Control Input Logic:Active High Voltage - Supply:2.4V~5.5V Voltage - Supply:2.4V~5.5V Maximum Continuous Current:2A RDS(on):80mΩ Features:Short-Circuit  Protection；Overcurrent Protection；Reverse current blocking；; Manufacturer 1: Silergy; ComponentLink1Description: LCSC; ComponentLink1URL: https://www.lcsc.com/product-detail/C55136.html?s_z=n_q_SY6280AAC; Manufacturer Part Number 1: SY6280AAC; Supplier 1: LCSC; Supplier Part Number 1: C55136
footprint SOT-23-5_L3.0-W1.7-P0.95-LS2.8-BL
pins: 1 OUT, 2 GND, 3 ISET, 4 EN, 5 IN

## tf-card-9p
designator U??
Card Connection Mode:Push-Push Card Type:MicroSD Card (TF Card) Connector Type:Connector and Ejector Height Above Board:1.8mm Operating Temperature:-25℃~+90℃ Operating Temperature:-25℃~+90℃; Manufacturer 1: BXCONN; ComponentLink1Description: LCSC; ComponentLink1URL: https://www.lcsc.com/es/product-detail/C53144700.html?s_z=n_q_tf-card-9p&spm=wm.fly.bg.0.xh&lcsc_vid=FFRdVwAETgNbVwAHTlRdV1UFEwcIU1ZXQVZZAlYFQAcxVlNfRlJdUlNWQ1NWXjsOAxUeFF5JWBYZEEoKFBINSQcJGk4LFEsWBQ4KEgcSWgULEwUPG04tXlReRVBXSQwSGg0%3D; Supplier 1: LCSC; Supplier Part Number 1: C53144700; Manufacturer Part Number 1: TF-CARD-9P
footprint SIM-SMD_LX_XDFP-0090-012
pins: 1 DAT2, 2 CD/DAT3, 3 CMD, 4 VDD, 5 CLX, 6 VSS, 7 DAT0, 8 DAT1, 9 CD, 10 GND

## tps2553drvr
designator U??  (value not drawn)
Type:High Side Switch Number of Channels:1 Control Input Logic:Active High Voltage - Supply:2.5V~6.5V Voltage - Supply:2.5V~6.5V Maximum Continuous Current:1.5A RDS(on):100mΩ Features:Overcurrent Protection；Short-Circuit  Protection；Integrated charge pump; Manufacturer 1: TI; Manufacturer Part Number 1: TPS2553DRVR; Supplier Part Number 1: C138719; Supplier: LCSC
footprint WSON-6_L2.0-W2.0-P0.65-TL-EP
pins: 1 OUT, 2 ILIM, 3 FAULT#, 4 EN, 5 GND, 6 IN, 7 EP

## TVS_5.25V_2CH_SOT_23_6
designator U?, comment USBLC6-2SC6
TVS DIODE 5.25V 17V SOT23-6; Manufacturer 1: STMicroelectronics; ComponentLink1Description: LCSC; ComponentLink1URL: https://www.lcsc.com/product-detail/ESD-Protection-Devices_STMicroelectronics-USBLC6-2SC6_C7519.html; Supplier 1: LCSC; Manufacturer Part Number 1: USBLC6-2SC6; Supplier Part Number 1: C7519
footprint SOT_23_6 (/ 20190225 / V-A.Patino)
pins: 1 I/O1 (io), 2 GND (power), 3 I/O2 (io), 4 I/O2 (io), 5 Vbus (power), 6 I/O1 (io)